# EAGLE library part TPS61021A (library madhu)
Texas Instruments 3-A Boost Converter with 0.5-V Ultra Low Input Voltage
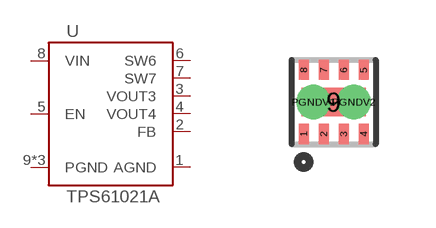
[diagram p28: symbol with the pads of WSON8; footprint WSON8]

Designator prefix U

## TPS61021A-WSON8  [WSON8]
1  AGND  pwr
2  FB  in
3  VOUT3
4  VOUT4
5  EN  in
6  SW6
7  SW7
8  VIN  pwr
9  PGND  pwr
PGNDV1  PGND  pwr
PGNDV2  PGND  pwr

## Footprint WSON8 (pad centres in mm)
Texas Instruments 2mm WSON8 Used in TPS61021a
smd 0.25 x 0.5: 1 -0.75,-0.8; 2 -0.25,-0.8; 3 0.25,-0.8; 4 0.75,-0.8; 5 0.75,0.8; 6 0.25,0.8; 7 -0.25,0.8; 8 -0.75,0.8
smd 1.6 x 0.7: 9 0,0
drill 0.35 pad 0.61: PGNDV1 -0.508,0; PGNDV2 0.508,0